# Altium footprint library StandardCase.PcbLib: 209 footprints (part 5 of 14)
Each footprint in its own frame and in the unit in brackets; x right, y up, seen from the top. Pads: shape width x height; smd on the part's side, far side on the other; paste and mask are expansions set on the pad; w line width, h text height; cw(c..) or ccw(c..) is an arc to the next point about the centre after c.
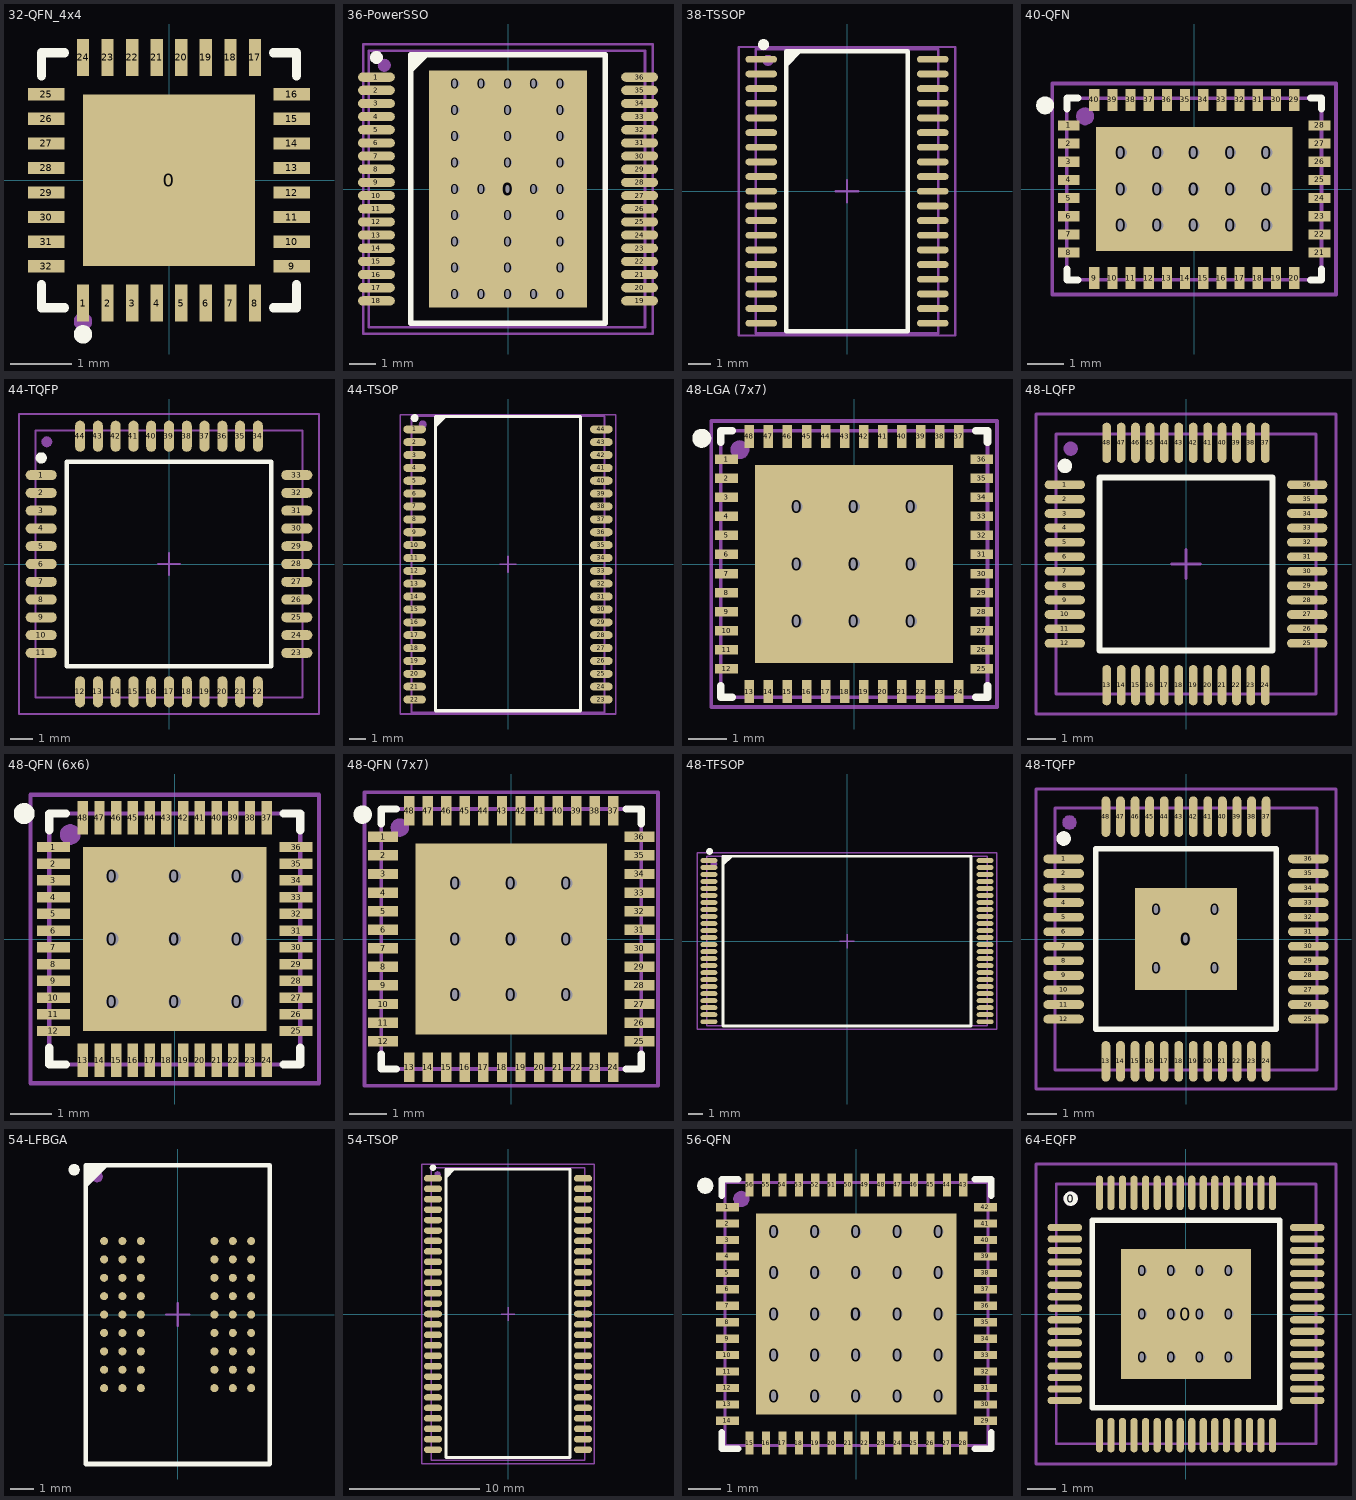
[diagram p4: the footprints below, top view; thin cyan lines are the x and y axes]

## 32-QFN_4x4 [mm]
pads (33):
  rect 2.8x2.8 smd: 0(0,0)
  rect 0.2x0.6 smd: 1(-1.4,-2) 2(-1,-2) 3(-0.6,-2) 4(-0.2,-2) 5(0.2,-2) 6(0.6,-2) 7(1,-2) 8(1.4,-2) 17(1.4,2) 18(1,2) 19(0.6,2) 20(0.2,2) 21(-0.2,2) 22(-0.6,2) 23(-1,2) 24(-1.4,2)
  rect 0.6x0.2 smd: 9(2,-1.4) 10(2,-1) 11(2,-0.6) 12(2,-0.2) 13(2,0.2) 14(2,0.6) 15(2,1) 16(2,1.4) 25(-2,1.4) 26(-2,1) 27(-2,0.6) 28(-2,0.2) 29(-2,-0.2) 30(-2,-0.6) 31(-2,-1) 32(-2,-1.4)
Top Overlay:
  circle w0.15: c-1.4,-2.51 r0.075
  lines w0.152: -2.076,-1.703 -2.076,-2.076 -1.703,-2.076 ; -2.076,1.703 -2.076,2.076 -1.703,2.076 ; 1.703,-2.076 2.076,-2.076 2.076,-1.703 ; 1.703,2.076 2.076,2.076 2.076,1.703
Top Paste:
  region: -1.3,2.3 -1.5,2.3 -1.5,1.7 -1.3,1.7
  region: -0.9,2.3 -1.1,2.3 -1.1,1.7 -0.9,1.7
  region: -0.5,2.3 -0.7,2.3 -0.7,1.7 -0.5,1.7
  region: -0.1,2.3 -0.3,2.3 -0.3,1.7 -0.1,1.7
  region: 0.3,2.3 0.1,2.3 0.1,1.7 0.3,1.7
  region: 0.7,2.3 0.5,2.3 0.5,1.7 0.7,1.7
  region: 1.1,2.3 0.9,2.3 0.9,1.7 1.1,1.7
  region: 1.5,2.3 1.3,2.3 1.3,1.7 1.5,1.7
  region: 2.3,1.3 2.3,1.5 1.7,1.5 1.7,1.3
  region: 2.3,0.9 2.3,1.1 1.7,1.1 1.7,0.9
  region: 2.3,0.5 2.3,0.7 1.7,0.7 1.7,0.5
  region: 2.3,0.1 2.3,0.3 1.7,0.3 1.7,0.1
  region: 2.3,-0.3 2.3,-0.1 1.7,-0.1 1.7,-0.3
  region: 2.3,-0.7 2.3,-0.5 1.7,-0.5 1.7,-0.7
  region: 2.3,-1.1 2.3,-0.9 1.7,-0.9 1.7,-1.1
  region: 2.3,-1.5 2.3,-1.3 1.7,-1.3 1.7,-1.5
  region: -1.3,-1.7 -1.5,-1.7 -1.5,-2.3 -1.3,-2.3
  region: -0.9,-1.7 -1.1,-1.7 -1.1,-2.3 -0.9,-2.3
  region: -0.5,-1.7 -0.7,-1.7 -0.7,-2.3 -0.5,-2.3
  region: -0.1,-1.7 -0.3,-1.7 -0.3,-2.3 -0.1,-2.3
  region: 0.3,-1.7 0.1,-1.7 0.1,-2.3 0.3,-2.3
  region: 0.7,-1.7 0.5,-1.7 0.5,-2.3 0.7,-2.3
  region: 1.1,-1.7 0.9,-1.7 0.9,-2.3 1.1,-2.3
  region: 1.5,-1.7 1.3,-1.7 1.3,-2.3 1.5,-2.3
  region: -1.7,-1.5 -1.7,-1.3 -2.3,-1.3 -2.3,-1.5
  region: -1.7,-1.1 -1.7,-0.9 -2.3,-0.9 -2.3,-1.1
  region: -1.7,-0.7 -1.7,-0.5 -2.3,-0.5 -2.3,-0.7
  region: -1.7,-0.3 -1.7,-0.1 -2.3,-0.1 -2.3,-0.3
  region: -1.7,0.1 -1.7,0.3 -2.3,0.3 -2.3,0.1
  region: -1.7,0.5 -1.7,0.7 -2.3,0.7 -2.3,0.5
  region: -1.7,0.9 -1.7,1.1 -2.3,1.1 -2.3,0.9
  region: -1.7,1.3 -1.7,1.5 -2.3,1.5 -2.3,1.3
  region: -1.12,-1.12 -1.12,1.12 1.12,1.12 1.12,-1.12
Mechanical 15:
  circle w0.15: c-1.4,-2.3 r0.075
3D body "User Library-QFN 32.step": height 0.57, standoff -0.04, extent -2.001,-2.001 2.001,2.001

## 36-PowerSSO [mm] "pitch 0.5 mm, power pad"
height 2.5
pads (72):
  round 0.7 hole 0.3: 0(-2,-4) 0(-2,-3) 0(-2,-2) 0(-2,-1) 0(-2,0) 0(-2,1) 0(-2,2) 0(-2,3) 0(-2,4) 0(-1,-4) 0(-1,0) 0(-1,4) 0(0,-4) 0(0,-3) 0(0,-2) 0(0,-1) 0(0,0) 0(0,1) 0(0,2) 0(0,3) 0(0,4) 0(1,-4) 0(1,0) 0(1,4) 0(2,-4) 0(2,-3) 0(2,-2) 0(2,-1) 0(2,0) 0(2,1) 0(2,2) 0(2,3) 0(2,4)
  rect 6x9 smd: 0(0,0)
  rrect100% 1.4x0.35 smd: 1(-5,4.25) 2(-5,3.75) 3(-5,3.25) 4(-5,2.75) 5(-5,2.25) 6(-5,1.75) 7(-5,1.25) 8(-5,0.75) 9(-5,0.25) 10(-5,-0.25) 11(-5,-0.75) 12(-5,-1.25) 13(-5,-1.75) 14(-5,-2.25) 15(-5,-2.75) 16(-5,-3.25) 17(-5,-3.75) 18(-5,-4.25) 19(5,-4.25) 20(5,-3.75) 21(5,-3.25) 22(5,-2.75) 23(5,-2.25) 24(5,-1.75) 25(5,-1.25) 26(5,-0.75) 27(5,-0.25) 28(5,0.25) 29(5,0.75) 30(5,1.25) 31(5,1.75) 32(5,2.25) 33(5,2.75) 34(5,3.25) 35(5,3.75) 36(5,4.25)
  round 0.5 on Top Overlay: ""(-5,5)
  round 0.5 on Mech1: ""(-4.7,4.7)
Top Overlay:
  region: -3.7,5.1 -3.7,4.38 -2.98,5.1
  lines w0.2: -3.7,-5.1 3.7,-5.1 3.7,5.1 -3.7,5.1 -3.7,-5.1
Mechanical 1:
  lines w0.1: -5.294,-5.25 5.206,-5.25 5.206,5.25 -5.294,5.25 -5.294,-5.25
Mechanical 15:
  lines w0.1: -0.5,0 0.5,0 ; 0,-0.5 0,0.5 ; -5.5,-5.5 5.5,-5.5 5.5,5.5 -5.5,5.5 -5.5,-5.5
3D body "User Library-PowerSSO36-EPU.STEP": height 2.31, standoff -0.01, extent -5.294,-5.25 5.206,5.25

## 38-TSSOP [mm] "pitch 0.65 mm"
height 1.2
pads (40):
  oval 1.4x0.3 smd: 1(-3.8,5.85) 2(-3.8,5.2) 3(-3.8,4.55) 4(-3.8,3.9) 5(-3.8,3.25) 6(-3.8,2.6) 7(-3.8,1.95) 8(-3.8,1.3) 9(-3.8,0.65) 10(-3.8,0) 11(-3.8,-0.65) 12(-3.8,-1.3) 13(-3.8,-1.95) 14(-3.8,-2.6) 15(-3.8,-3.25) 16(-3.8,-3.9) 17(-3.8,-4.55) 18(-3.8,-5.2) 19(-3.8,-5.85) 20(3.8,-5.85) 21(3.8,-5.2) 22(3.8,-4.55) 23(3.8,-3.9) 24(3.8,-3.25) 25(3.8,-2.6) 26(3.8,-1.95) 27(3.8,-1.3) 28(3.8,-0.65) 29(3.8,0) 30(3.8,0.65) 31(3.8,1.3) 32(3.8,1.95) 33(3.8,2.6) 34(3.8,3.25) 35(3.8,3.9) 36(3.8,4.55) 37(3.8,5.2) 38(3.8,5.85)
  round 0.5 on Top Overlay: ""(-3.7,6.5)
  round 0.5 on Mech1: ""(-3.5,5.8)
Top Overlay:
  region: -2.7,6.2 -2.7,5.48 -1.98,6.2
  lines w0.2: -2.7,-6.2 2.7,-6.2 2.7,6.2 -2.7,6.2 -2.7,-6.2
Mechanical 1:
  lines w0.1: -4.05,-6.3 4.05,-6.3 4.05,6.3 -4.05,6.3 -4.05,-6.3
Mechanical 15:
  lines w0.1: -0.5,0 0.5,0 ; 0,-0.5 0,0.5 ; -4.8,-6.4 -4.8,6.4 4.8,6.4 4.8,-6.4 -4.8,-6.4
3D body "User Library-TSSOP-38 12_6x6_2.STEP": height 1.1, standoff 0, extent -4.05,-6.3 4.05,6.3

## 40-QFN [mm] "5x7 mm, pitch 0.5 mm, power pad"
height 0.9
pads (58):
  round 0.7 hole 0.3: 0(-2,-1) 0(-2,0) 0(-2,1) 0(-1,-1) 0(-1,0) 0(-1,1) 0(0,-1) 0(0,0) 0(0,1) 0(1,-1) 0(1,0) 0(1,1) 0(2,-1) 0(2,0) 0(2,1)
  rect 5.4x3.4 smd: 0(0,0)
  rect 0.6x0.28 smd: 1(-3.45,1.75) 2(-3.45,1.25) 3(-3.45,0.75) 4(-3.45,0.25) 5(-3.45,-0.25) 6(-3.45,-0.75) 7(-3.45,-1.25) 8(-3.45,-1.75) 21(3.45,-1.75) 22(3.45,-1.25) 23(3.45,-0.75) 24(3.45,-0.25) 25(3.45,0.25) 26(3.45,0.75) 27(3.45,1.25) 28(3.45,1.75)
  rect 0.28x0.6 smd: 9(-2.75,-2.45) 10(-2.25,-2.45) 11(-1.75,-2.45) 12(-1.25,-2.45) 13(-0.75,-2.45) 14(-0.25,-2.45) 15(0.25,-2.45) 16(0.75,-2.45) 17(1.25,-2.45) 18(1.75,-2.45) 19(2.25,-2.45) 20(2.75,-2.45) 29(2.75,2.45) 30(2.25,2.45) 31(1.75,2.45) 32(1.25,2.45) 33(0.75,2.45) 34(0.25,2.45) 35(-0.25,2.45) 36(-0.75,2.45) 37(-1.25,2.45) 38(-1.75,2.45) 39(-2.25,2.45) 40(-2.75,2.45)
  round 0.5 on Top Overlay: ""(-4.1,2.3)
  round 0.5 on Mech1: ""(-3,2)
Top Overlay:
  lines w0.2: -3.5,-2.2 -3.5,-2.5 -3.2,-2.5 ; -3.5,2.2 -3.5,2.5 -3.2,2.5 ; 3.2,-2.5 3.5,-2.5 3.5,-2.2 ; 3.2,2.5 3.5,2.5 3.5,2.2
Mechanical 1:
  lines w0.1: -3.5,-2.5 3.5,-2.5 3.5,2.5 -3.5,2.5 -3.5,-2.5
Mechanical 15:
  lines w0.1: -0.5,0 0.5,0 ; 0,-0.5 0,0.5 ; -3.9,-2.9 3.9,-2.9 3.9,2.9 -3.9,2.9 -3.9,-2.9
3D body "User Library-QFN 40-Pin 0_5mm Pitch (7_0mm x 5_0mm).STEP": height 1, standoff 0, extent -3.505,-2.505 3.505,2.505

## 44-TQFP [mm] "pitch 0.8 mm"
height 2
pads (45):
  rrect100% 1.4x0.45 smd: 1(-5.75,4) 2(-5.75,3.2) 3(-5.75,2.4) 4(-5.75,1.6) 5(-5.75,0.8) 6(-5.75,0) 7(-5.75,-0.8) 8(-5.75,-1.6) 9(-5.75,-2.4) 10(-5.75,-3.2) 11(-5.75,-4) 23(5.75,-4) 24(5.75,-3.2) 25(5.75,-2.4) 26(5.75,-1.6) 27(5.75,-0.8) 28(5.75,0) 29(5.75,0.8) 30(5.75,1.6) 31(5.75,2.4) 32(5.75,3.2) 33(5.75,4)
  rrect100% 0.45x1.4 smd: 12(-4,-5.75) 13(-3.2,-5.75) 14(-2.4,-5.75) 15(-1.6,-5.75) 16(-0.8,-5.75) 17(0,-5.75) 18(0.8,-5.75) 19(1.6,-5.75) 20(2.4,-5.75) 21(3.2,-5.75) 22(4,-5.75) 34(4,5.75) 35(3.2,5.75) 36(2.4,5.75) 37(1.6,5.75) 38(0.8,5.75) 39(0,5.75) 40(-0.8,5.75) 41(-1.6,5.75) 42(-2.4,5.75) 43(-3.2,5.75) 44(-4,5.75)
  round 0.5 on Mech1: ""(-5.5,5.5)
Top Overlay:
  circle w0.25: c-5.75,4.775 r0.125
  lines w0.2: -4.6,-4.6 4.6,-4.6 4.6,4.6 -4.6,4.6 -4.6,-4.6
Mechanical 1:
  lines w0.1: -6.009,-6.009 6.009,-6.009 6.009,6.009 -6.009,6.009 -6.009,-6.009
Mechanical 15:
  lines w0.1: -0.5,0 0.5,0 ; 0,-0.5 0,0.5 ; -6.75,-6.75 6.75,-6.75 6.75,6.75 -6.75,6.75 -6.75,-6.75
3D body "TQFP44.step": height 1.1, standoff 0, extent -6.009,-6.009 6.009,6.009

## 44-TSOP [mm] "pitch 0.8 mm"
height 5.6
pads (46):
  rrect100% 1.4x0.5 smd: 1(-5.8,8.4) 2(-5.8,7.6) 3(-5.8,6.8) 4(-5.8,6) 5(-5.8,5.2) 6(-5.8,4.4) 7(-5.8,3.6) 8(-5.8,2.8) 9(-5.8,2) 10(-5.8,1.2) 11(-5.8,0.4) 12(-5.8,-0.4) 13(-5.8,-1.2) 14(-5.8,-2) 15(-5.8,-2.8) 16(-5.8,-3.6) 17(-5.8,-4.4) 18(-5.8,-5.2) 19(-5.8,-6) 20(-5.8,-6.8) 21(-5.8,-7.6) 22(-5.8,-8.4) 23(5.8,-8.4) 24(5.8,-7.6) 25(5.8,-6.8) 26(5.8,-6) 27(5.8,-5.2) 28(5.8,-4.4) 29(5.8,-3.6) 30(5.8,-2.8) 31(5.8,-2) 32(5.8,-1.2) 33(5.8,-0.4) 34(5.8,0.4) 35(5.8,1.2) 36(5.8,2) 37(5.8,2.8) 38(5.8,3.6) 39(5.8,4.4) 40(5.8,5.2) 41(5.8,6) 42(5.8,6.8) 43(5.8,7.6) 44(5.8,8.4)
  round 0.5 on Top Overlay: ""(-5.8,9.1)
  round 0.5 on Mech1: ""(-5.3,8.7)
Top Overlay:
  region: -4.5,9.2 -4.5,8.48 -3.78,9.2
  lines w0.2: -4.5,-9.1 -4.5,9.2 4.5,9.2 4.5,-9.1 -4.5,-9.1
Mechanical 1:
  lines w0.1: -6,-9.21 -6,9.21 6,9.21 6,-9.21 -6,-9.21
Mechanical 15:
  lines w0.1: -0.5,0 0.5,0 ; 0,-0.5 0,0.5 ; -6.7,-9.3 6.7,-9.3 6.7,9.3 -6.7,9.3 -6.7,-9.3
3D body "User Library-ISSI TSOP II-44.STEP": height 1.2, standoff 0, extent -5.98,-9.26 5.98,9.26

## 48-LGA (7x7) [mm] "7x7 mm, pitch 0.5 mm, power pad"
height 0.75
pads (59):
  round 0.7 hole 0.3: 0(-1.5,-1.5) 0(-1.5,0) 0(-1.5,1.5) 0(0,-1.5) 0(0,0) 0(0,1.5) 0(1.5,-1.5) 0(1.5,0) 0(1.5,1.5)
  rect 5.2x5.2 smd mask+0.05: 0(0,0)
  rect 0.6x0.25 smd mask+0.05: 1(-3.35,2.75) 2(-3.35,2.25) 3(-3.35,1.75) 4(-3.35,1.25) 5(-3.35,0.75) 6(-3.35,0.25) 7(-3.35,-0.25) 8(-3.35,-0.75) 9(-3.35,-1.25) 10(-3.35,-1.75) 11(-3.35,-2.25) 12(-3.35,-2.75) 25(3.35,-2.75) 26(3.35,-2.25) 27(3.35,-1.75) 28(3.35,-1.25) 29(3.35,-0.75) 30(3.35,-0.25) 31(3.35,0.25) 32(3.35,0.75) 33(3.35,1.25) 34(3.35,1.75) 35(3.35,2.25) 36(3.35,2.75)
  rect 0.25x0.6 smd mask+0.05: 13(-2.75,-3.35) 14(-2.25,-3.35) 15(-1.75,-3.35) 16(-1.25,-3.35) 17(-0.75,-3.35) 18(-0.25,-3.35) 19(0.25,-3.35) 20(0.75,-3.35) 21(1.25,-3.35) 22(1.75,-3.35) 23(2.25,-3.35) 24(2.75,-3.35) 37(2.75,3.35) 38(2.25,3.35) 39(1.75,3.35) 40(1.25,3.35) 41(0.75,3.35) 42(0.25,3.35) 43(-0.25,3.35) 44(-0.75,3.35) 45(-1.25,3.35) 46(-1.75,3.35) 47(-2.25,3.35) 48(-2.75,3.35)
  round 0.5 on Mech1: ""(-3,3)
Top Overlay:
  circle w0.25: c-4,3.3 r0.125
  lines w0.2: -3.5,-3.2 -3.5,-3.5 -3.2,-3.5 ; -3.5,3.2 -3.5,3.5 -3.2,3.5 ; 3.2,-3.5 3.5,-3.5 3.5,-3.2 ; 3.2,3.5 3.5,3.5 3.5,3.2
Mechanical 1:
  lines w0.1: -3.5,-3.5 3.5,-3.5 3.5,3.5 -3.5,3.5 -3.5,-3.5
Mechanical 15:
  lines w0.1: -0.5,0 0.5,0 ; 0,-0.5 0,0.5 ; -3.75,-3.75 3.75,-3.75 3.75,3.75 -3.75,3.75 -3.75,-3.75
3D body "ESP v4.step": height 1, standoff 0.06, extent -3.5,-3.5 3.5,3.5

## 48-LQFP [mm] "QFP, 48-Leads, Body 7x7mm, Pitch 0.5mm, IPC Medium Density"
height 1.6
pads (49):
  oval 1.4x0.3 smd: 1(-4.2,2.75) 2(-4.2,2.25) 3(-4.2,1.75) 4(-4.2,1.25) 5(-4.2,0.75) 6(-4.2,0.25) 7(-4.2,-0.25) 8(-4.2,-0.75) 9(-4.2,-1.25) 10(-4.2,-1.75) 11(-4.2,-2.25) 12(-4.2,-2.75) 25(4.2,-2.75) 26(4.2,-2.25) 27(4.2,-1.75) 28(4.2,-1.25) 29(4.2,-0.75) 30(4.2,-0.25) 31(4.2,0.25) 32(4.2,0.75) 33(4.2,1.25) 34(4.2,1.75) 35(4.2,2.25) 36(4.2,2.75)
  oval 0.3x1.4 smd: 13(-2.75,-4.2) 14(-2.25,-4.2) 15(-1.75,-4.2) 16(-1.25,-4.2) 17(-0.75,-4.2) 18(-0.25,-4.2) 19(0.25,-4.2) 20(0.75,-4.2) 21(1.25,-4.2) 22(1.75,-4.2) 23(2.25,-4.2) 24(2.75,-4.2) 37(2.75,4.2) 38(2.25,4.2) 39(1.75,4.2) 40(1.25,4.2) 41(0.75,4.2) 42(0.25,4.2) 43(-0.25,4.2) 44(-0.75,4.2) 45(-1.25,4.2) 46(-1.75,4.2) 47(-2.25,4.2) 48(-2.75,4.2)
  round 0.5 on Mech1: ""(-4,4)
Top Overlay:
  circle w0.25: c-4.2,3.4 r0.125
  lines w0.2: -3,-3 3,-3 3,3 -3,3 -3,-3
Mechanical 1:
  lines w0.1: -4.5,-4.5 4.5,-4.5 4.5,4.5 -4.5,4.5 -4.5,-4.5
Mechanical 15:
  lines w0.1: -0.5,0 0.5,0 ; 0,-0.5 0,0.5 ; -5.2,-5.2 5.2,-5.2 5.2,5.2 -5.2,5.2 -5.2,-5.2
3D body "STM32F334.step": height 1.6, standoff 0, extent -4.5,-4.5 4.5,4.5

## 48-QFN (6x6) [mm] "6x6 mm, pitch 0.4 mm, power pad"
height 0.85
pads (59):
  round 0.7 hole 0.3: 0(-1.5,-1.5) 0(-1.5,0) 0(-1.5,1.5) 0(0,-1.5) 0(0,0) 0(0,1.5) 0(1.5,-1.5) 0(1.5,0) 0(1.5,1.5)
  rect 4.4x4.4 smd: 0(0,0)
  rect 0.8x0.25 smd: 1(-2.9,2.2) 2(-2.9,1.8) 3(-2.9,1.4) 4(-2.9,1) 5(-2.9,0.6) 6(-2.9,0.2) 7(-2.9,-0.2) 8(-2.9,-0.6) 9(-2.9,-1) 10(-2.9,-1.4) 11(-2.9,-1.8) 12(-2.9,-2.2) 25(2.9,-2.2) 26(2.9,-1.8) 27(2.9,-1.4) 28(2.9,-1) 29(2.9,-0.6) 30(2.9,-0.2) 31(2.9,0.2) 32(2.9,0.6) 33(2.9,1) 34(2.9,1.4) 35(2.9,1.8) 36(2.9,2.2)
  rect 0.25x0.8 smd: 13(-2.2,-2.9) 14(-1.8,-2.9) 15(-1.4,-2.9) 16(-1,-2.9) 17(-0.6,-2.9) 18(-0.2,-2.9) 19(0.2,-2.9) 20(0.6,-2.9) 21(1,-2.9) 22(1.4,-2.9) 23(1.8,-2.9) 24(2.2,-2.9) 37(2.2,2.9) 38(1.8,2.9) 39(1.4,2.9) 40(1,2.9) 41(0.6,2.9) 42(0.2,2.9) 43(-0.2,2.9) 44(-0.6,2.9) 45(-1,2.9) 46(-1.4,2.9) 47(-1.8,2.9) 48(-2.2,2.9)
  round 0.5 on Mech1 mask+0: ""(-2.5,2.5)
Top Overlay:
  circle w0.25: c-3.6,3 r0.125
  lines w0.2: -3,-2.6 -3,-3 -2.6,-3 ; -3,2.6 -3,3 -2.6,3 ; 2.6,-3 3,-3 3,-2.6 ; 2.6,3 3,3 3,2.6
Mechanical 1:
  lines w0.1: -3,-3 -3,3 3,3 3,-3 -3,-3
Mechanical 15:
  lines w0.1: -0.5,0 0.5,0 ; 0,-0.5 0,0.5 ; -3.45,-3.45 -3.45,3.45 3.45,3.45 3.45,-3.45 -3.45,-3.45
3D body "48-VFQFN (6x6).step": height 0.85, standoff 0, extent -3.02,-3.02 3.02,3.02

## 48-QFN (7x7) [mm] "7x7 mm, pitch 0.5 mm, power pad"
height 0.75
pads (59):
  round 0.7 hole 0.3: 0(-1.5,-1.5) 0(-1.5,0) 0(-1.5,1.5) 0(0,-1.5) 0(0,0) 0(0,1.5) 0(1.5,-1.5) 0(1.5,0) 0(1.5,1.5)
  rect 5.15x5.15 smd mask+0.05: 0(0,0)
  rect 0.8x0.28 smd mask+0.05: 1(-3.45,2.75) 2(-3.45,2.25) 3(-3.45,1.75) 4(-3.45,1.25) 5(-3.45,0.75) 6(-3.45,0.25) 7(-3.45,-0.25) 8(-3.45,-0.75) 9(-3.45,-1.25) 10(-3.45,-1.75) 11(-3.45,-2.25) 12(-3.45,-2.75) 25(3.45,-2.75) 26(3.45,-2.25) 27(3.45,-1.75) 28(3.45,-1.25) 29(3.45,-0.75) 30(3.45,-0.25) 31(3.45,0.25) 32(3.45,0.75) 33(3.45,1.25) 34(3.45,1.75) 35(3.45,2.25) 36(3.45,2.75)
  rect 0.28x0.8 smd mask+0.05: 13(-2.75,-3.45) 14(-2.25,-3.45) 15(-1.75,-3.45) 16(-1.25,-3.45) 17(-0.75,-3.45) 18(-0.25,-3.45) 19(0.25,-3.45) 20(0.75,-3.45) 21(1.25,-3.45) 22(1.75,-3.45) 23(2.25,-3.45) 24(2.75,-3.45) 37(2.75,3.45) 38(2.25,3.45) 39(1.75,3.45) 40(1.25,3.45) 41(0.75,3.45) 42(0.25,3.45) 43(-0.25,3.45) 44(-0.75,3.45) 45(-1.25,3.45) 46(-1.75,3.45) 47(-2.25,3.45) 48(-2.75,3.45)
  round 0.5 on Mech1: ""(-3,3)
Top Overlay:
  circle w0.25: c-4,3.35 r0.125
  lines w0.2: -3.5,-3.1 -3.5,-3.5 -3.1,-3.5 ; -3.5,3.1 -3.5,3.5 -3.1,3.5 ; 3.1,-3.5 3.5,-3.5 3.5,-3.1 ; 3.1,3.5 3.5,3.5 3.5,3.1
Mechanical 1:
  lines w0.1: -3.5,-3.5 -3.5,3.5 3.5,3.5 3.5,-3.5 -3.5,-3.5
Mechanical 15:
  lines w0.1: -0.5,0 0.5,0 ; 0,-0.5 0,0.5 ; -3.95,-3.95 -3.95,3.95 3.95,3.95 3.95,-3.95 -3.95,-3.95
3D body "User Library-QFN48_7x7.STEP": height 0.78, standoff -0.02, extent -3.51,-3.51 3.51,3.51

## 48-TFSOP [mm] "pitch 0.5 mm"
height 1.2
pads (50):
  oval 1.2x0.35 smd: 1(-9.85,5.75) 2(-9.85,5.25) 3(-9.85,4.75) 4(-9.85,4.25) 5(-9.85,3.75) 6(-9.85,3.25) 7(-9.85,2.75) 8(-9.85,2.25) 9(-9.85,1.75) 10(-9.85,1.25) 11(-9.85,0.75) 12(-9.85,0.25) 13(-9.85,-0.25) 14(-9.85,-0.75) 15(-9.85,-1.25) 16(-9.85,-1.75) 17(-9.85,-2.25) 18(-9.85,-2.75) 19(-9.85,-3.25) 20(-9.85,-3.75) 21(-9.85,-4.25) 22(-9.85,-4.75) 23(-9.85,-5.25) 24(-9.85,-5.75) 25(9.85,-5.75) 26(9.85,-5.25) 27(9.85,-4.75) 28(9.85,-4.25) 29(9.85,-3.75) 30(9.85,-3.25) 31(9.85,-2.75) 32(9.85,-2.25) 33(9.85,-1.75) 34(9.85,-1.25) 35(9.85,-0.75) 36(9.85,-0.25) 37(9.85,0.25) 38(9.85,0.75) 39(9.85,1.25) 40(9.85,1.75) 41(9.85,2.25) 42(9.85,2.75) 43(9.85,3.25) 44(9.85,3.75) 45(9.85,4.25) 46(9.85,4.75) 47(9.85,5.25) 48(9.85,5.75)
  round 0.5 on Mech1: 2(-9.5,5.5)
  round 0.5 on Top Overlay: ""(-9.8,6.4)
Top Overlay:
  region: -8.85,6.05 -8.85,5.33 -8.13,6.05
  lines w0.2: -8.85,-6.05 8.85,-6.05 8.85,6.05 -8.85,6.05 -8.85,-6.05
Mechanical 1:
  lines w0.1: -10,-6.05 10,-6.05 10,6.05 -10,6.05 -10,-6.05
Mechanical 15:
  lines w0.1: -0.5,0 0.5,0 ; 0,-0.5 0,0.5 ; -10.7,-6.3 10.7,-6.3 10.7,6.3 -10.7,6.3 -10.7,-6.3
3D body "48-TFSOP.step": height 1.2, standoff 0, extent -10,-6.05 10,6.05

## 48-TQFP [mm] "pitch 0.5 mm, power pad"
height 1.2
pads (55):
  round 0.7 hole 0.3: 0(-1,-1) 0(-1,1) 0(0,0) 0(1,-1) 0(1,1)
  rect 3.5x3.5 smd: 0(0,0)
  oval 1.4x0.3 smd: 1(-4.2,2.75) 2(-4.2,2.25) 3(-4.2,1.75) 4(-4.2,1.25) 5(-4.2,0.75) 6(-4.2,0.25) 7(-4.2,-0.25) 8(-4.2,-0.75) 9(-4.2,-1.25) 10(-4.2,-1.75) 11(-4.2,-2.25) 12(-4.2,-2.75) 25(4.2,-2.75) 26(4.2,-2.25) 27(4.2,-1.75) 28(4.2,-1.25) 29(4.2,-0.75) 30(4.2,-0.25) 31(4.2,0.25) 32(4.2,0.75) 33(4.2,1.25) 34(4.2,1.75) 35(4.2,2.25) 36(4.2,2.75)
  oval 0.3x1.4 smd: 13(-2.75,-4.2) 14(-2.25,-4.2) 15(-1.75,-4.2) 16(-1.25,-4.2) 17(-0.75,-4.2) 18(-0.25,-4.2) 19(0.25,-4.2) 20(0.75,-4.2) 21(1.25,-4.2) 22(1.75,-4.2) 23(2.25,-4.2) 24(2.75,-4.2) 37(2.75,4.2) 38(2.25,4.2) 39(1.75,4.2) 40(1.25,4.2) 41(0.75,4.2) 42(0.25,4.2) 43(-0.25,4.2) 44(-0.75,4.2) 45(-1.25,4.2) 46(-1.75,4.2) 47(-2.25,4.2) 48(-2.75,4.2)
  round 0.5 on Mech1: ""(-4,4)
Top Overlay:
  circle w0.25: c-4.2,3.45 r0.125
  lines w0.2: -3.1,-3.1 3.1,-3.1 3.1,3.1 -3.1,3.1 -3.1,-3.1
Mechanical 1:
  lines w0.1: -4.5,-4.5 4.5,-4.5 4.5,4.5 -4.5,4.5 -4.5,-4.5
Mechanical 15:
  lines w0.1: -0.5,0 0.5,0 ; 0,-0.5 0,0.5 ; -5.15,-5.15 5.15,-5.15 5.15,5.15 -5.15,5.15 -5.15,-5.15
3D body "48-TQFP.step": height 1.2, standoff 0, extent -4.5,-4.5 4.5,4.5

## 54-LFBGA [mm] "pitch 0.8 mm"
pads (56):
  round 0.35 smd: A1(-3.2,3.2) A2(-2.4,3.2) A3(-1.6,3.2) A7(1.6,3.2) A8(2.4,3.2) A9(3.2,3.2) B1(-3.2,2.4) B2(-2.4,2.4) B3(-1.6,2.4) B7(1.6,2.4) B8(2.4,2.4) B9(3.2,2.4) C1(-3.2,1.6) C2(-2.4,1.6) C3(-1.6,1.6) C7(1.6,1.6) C8(2.4,1.6) C9(3.2,1.6) D1(-3.2,0.8) D2(-2.4,0.8) D3(-1.6,0.8) D7(1.6,0.8) D8(2.4,0.8) D9(3.2,0.8) E1(-3.2,0) E2(-2.4,0) E3(-1.6,0) E7(1.6,0) E8(2.4,0) E9(3.2,0) F1(-3.2,-0.8) F2(-2.4,-0.8) F3(-1.6,-0.8) F7(1.6,-0.8) F8(2.4,-0.8) F9(3.2,-0.8) G1(-3.2,-1.6) G2(-2.4,-1.6) G3(-1.6,-1.6) G7(1.6,-1.6) G8(2.4,-1.6) G9(3.2,-1.6) H1(-3.2,-2.4) H2(-2.4,-2.4) H3(-1.6,-2.4) H7(1.6,-2.4) H8(2.4,-2.4) H9(3.2,-2.4) J1(-3.2,-3.2) J2(-2.4,-3.2) J3(-1.6,-3.2) J7(1.6,-3.2) J8(2.4,-3.2) J9(3.2,-3.2)
  round 0.5 on Top Overlay: ""(-4.5,6.3)
  round 0.5 on Mech1: ""(-3.5,6)
Top Overlay:
  region: -4,6.5 -4,5.5 -3,6.5
  lines w0.2: -4,-6.5 0,-6.5 4,-6.5 4,6.5 -4,6.5 -4,-6.5
Mechanical 1:
  lines w0.1: -4,-6.5 4,-6.5 4,6.5 -4,6.5 -4,-6.5
Mechanical 15:
  lines w0.1: -0.5,0 0.5,0 ; 0,-0.5 0,0.5 ; -4,-6.5 -4,6.5 4,6.5 4,-6.5 -4,-6.5
3D body "777.STEP": height 1.1, standoff 0, extent -4,-6.5 4,6.5

## 54-TSOP [mm] "pitch 0.8 mm"
height 1.2
pads (55):
  oval 1.4x0.5 smd: 1(-5.75,10.4) 2(-5.75,9.6) 3(-5.75,8.8) 4(-5.75,8) 5(-5.75,7.2) 6(-5.75,6.4) 7(-5.75,5.6) 8(-5.75,4.8) 9(-5.75,4) 10(-5.75,3.2) 11(-5.75,2.4) 12(-5.75,1.6) 13(-5.75,0.8) 14(-5.75,0) 15(-5.75,-0.8) 16(-5.75,-1.6) 17(-5.75,-2.4) 18(-5.75,-3.2) 19(-5.75,-4) 20(-5.75,-4.8) 21(-5.75,-5.6) 22(-5.75,-6.4) 23(-5.75,-7.2) 24(-5.75,-8) 25(-5.75,-8.8) 26(-5.75,-9.6) 27(-5.75,-10.4) 28(5.75,-10.4) 29(5.75,-9.6) 30(5.75,-8.8) 31(5.75,-8) 32(5.75,-7.2) 33(5.75,-6.4) 34(5.75,-5.6) 35(5.75,-4.8) 36(5.75,-4) 37(5.75,-3.2) 38(5.75,-2.4) 39(5.75,-1.6) 40(5.75,-0.8) 41(5.75,0) 42(5.75,0.8) 43(5.75,1.6) 44(5.75,2.4) 45(5.75,3.2) 46(5.75,4) 47(5.75,4.8) 48(5.75,5.6) 49(5.75,6.4) 50(5.75,7.2) 51(5.75,8) 52(5.75,8.8) 53(5.75,9.6) 54(5.75,10.4)
  round 0.5 on Mech1: ""(-5.4,10.7)
Top Overlay:
  circle w0.25: c-5.75,11.225 r0.125
  region: -4.75,11.1 -4.75,10.38 -4.03,11.1
  lines w0.2: -4.75,-11 4.75,-11 4.75,11.1 -4.75,11.1 -4.75,-11
Mechanical 1:
  lines w0.1: -5.88,-11.2 5.88,-11.2 5.88,11.2 -5.88,11.2 -5.88,-11.2
Mechanical 15:
  lines w0.1: -0.5,0 0.5,0 ; 0,-0.5 0,0.5 ; -6.6,-11.5 6.6,-11.5 6.6,11.5 -6.6,11.5 -6.6,-11.5
3D body "TSOP-54.step": height 1.2, standoff 0, extent -5.88,-11.2 5.88,11.2

## 56-QFN [mm] "8x8 mm, pitch 0.5 mm, power pad"
pads (84):
  round 0.7 hole 0.3: 0(-2.5,-2.5) 0(-2.5,-1.25) 0(-2.5,0) 0(-2.5,1.25) 0(-2.5,2.5) 0(-1.25,-2.5) 0(-1.25,-1.25) 0(-1.25,0) 0(-1.25,1.25) 0(-1.25,2.5) 0(0,-2.5) 0(0,-1.25) 0(0,0) 0(0,1.25) 0(0,2.5) 0(1.25,-2.5) 0(1.25,-1.25) 0(1.25,0) 0(1.25,1.25) 0(1.25,2.5) 0(2.5,-2.5) 0(2.5,-1.25) 0(2.5,0) 0(2.5,1.25) 0(2.5,2.5)
  rect 6.1x6.1 smd: 0(0,0)
  rect 0.7x0.25 smd: 1(-3.925,3.25) 2(-3.925,2.75) 3(-3.925,2.25) 4(-3.925,1.75) 5(-3.925,1.25) 6(-3.925,0.75) 7(-3.925,0.25) 8(-3.925,-0.25) 9(-3.925,-0.75) 10(-3.925,-1.25) 11(-3.925,-1.75) 12(-3.925,-2.25) 13(-3.925,-2.75) 14(-3.925,-3.25) 29(3.925,-3.25) 30(3.925,-2.75) 31(3.925,-2.25) 32(3.925,-1.75) 33(3.925,-1.25) 34(3.925,-0.75) 35(3.925,-0.25) 36(3.925,0.25) 37(3.925,0.75) 38(3.925,1.25) 39(3.925,1.75) 40(3.925,2.25) 41(3.925,2.75) 42(3.925,3.25)
  rect 0.25x0.7 smd: 15(-3.25,-3.925) 16(-2.75,-3.925) 17(-2.25,-3.925) 18(-1.75,-3.925) 19(-1.25,-3.925) 20(-0.75,-3.925) 21(-0.25,-3.925) 22(0.25,-3.925) 23(0.75,-3.925) 24(1.25,-3.925) 25(1.75,-3.925) 26(2.25,-3.925) 27(2.75,-3.925) 28(3.25,-3.925) 43(3.25,3.925) 44(2.75,3.925) 45(2.25,3.925) 46(1.75,3.925) 47(1.25,3.925) 48(0.75,3.925) 49(0.25,3.925) 50(-0.25,3.925) 51(-0.75,3.925) 52(-1.25,3.925) 53(-1.75,3.925) 54(-2.25,3.925) 55(-2.75,3.925) 56(-3.25,3.925)
  round 0.5 on Top Overlay: ""(-4.6,3.9)
  round 0.5 on Mech1: ""(-3.5,3.5)
Top Overlay:
  lines w0.2: -4.1,-3.6 -4.1,-4.1 -3.6,-4.1 ; -4.1,3.6 -4.1,4.1 -3.6,4.1 ; 3.6,-4.1 4.1,-4.1 4.1,-3.6 ; 3.6,4.1 4.1,4.1 4.1,3.6
Mechanical 1:
  lines w0.1: -4,4 4,4 4,-4 -4,-4 -4,4
Mechanical 15:
  lines w0.1: -0.5,0 0.5,0 ; 0,-0.5 0,0.5 ; -4,-4 -4,4 4,4 4,-4 -4,-4
3D body "User Library-TQFN56.STEP": height 0.77, standoff 0, extent -4,-4 4,4

## 64-EQFP [mm] "pitch 0.4 mm, power pad"
pads (79):
  round 0.5 on Mech1: 0(-4,4)
  round 0.7 hole 0.3: 0(-1.5,-1.5) 0(-1.5,0) 0(-1.5,1.5) 0(-0.5,-1.5) 0(-0.5,0) 0(-0.5,1.5) 0(0.5,-1.5) 0(0.5,0) 0(0.5,1.5) 0(1.5,-1.5) 0(1.5,0) 0(1.5,1.5)
  rect 4.5x4.5 smd: 0(0,0)
  oval 1.2x0.25 smd: 1(-4.2,3) 2(-4.2,2.6) 3(-4.2,2.2) 4(-4.2,1.8) 5(-4.2,1.4) 6(-4.2,1) 7(-4.2,0.6) 8(-4.2,0.2) 9(-4.2,-0.2) 10(-4.2,-0.6) 11(-4.2,-1) 12(-4.2,-1.4) 13(-4.2,-1.8) 14(-4.2,-2.2) 15(-4.2,-2.6) 16(-4.2,-3) 33(4.2,-3) 34(4.2,-2.6) 35(4.2,-2.2) 36(4.2,-1.8) 37(4.2,-1.4) 38(4.2,-1) 39(4.2,-0.6) 40(4.2,-0.2) 41(4.2,0.2) 42(4.2,0.6) 43(4.2,1) 44(4.2,1.4) 45(4.2,1.8) 46(4.2,2.2) 47(4.2,2.6) 48(4.2,3)
  oval 0.25x1.2 smd: 17(-3,-4.2) 18(-2.6,-4.2) 19(-2.2,-4.2) 20(-1.8,-4.2) 21(-1.4,-4.2) 22(-1,-4.2) 23(-0.6,-4.2) 24(-0.2,-4.2) 25(0.2,-4.2) 26(0.6,-4.2) 27(1,-4.2) 28(1.4,-4.2) 29(1.8,-4.2) 30(2.2,-4.2) 31(2.6,-4.2) 32(3,-4.2) 49(3,4.2) 50(2.6,4.2) 51(2.2,4.2) 52(1.8,4.2) 53(1.4,4.2) 54(1,4.2) 55(0.6,4.2) 56(0.2,4.2) 57(-0.2,4.2) 58(-0.6,4.2) 59(-1,4.2) 60(-1.4,4.2) 61(-1.8,4.2) 62(-2.2,4.2) 63(-2.6,4.2) 64(-3,4.2)
  round 0.5 on Top Overlay: ""(-4,4)
Top Overlay:
  lines w0.2: -3.25,-3.25 3.25,-3.25 3.25,3.25 -3.25,3.25 -3.25,-3.25
Mechanical 1:
  lines w0.1: -4.5,-4.5 -4.5,4.5 4.5,4.5 4.5,-4.5 -4.5,-4.5
Mechanical 15:
  lines w0.1: -0.5,0 0.5,0 ; 0,-0.5 0,0.5 ; -5.2,-5.2 5.2,-5.2 5.2,5.2 -5.2,5.2 -5.2,-5.2
3D body "User Library-EQFP64-1.STEP": height 0.94, standoff -0.01, extent -4.5,-4.5 4.5,4.5